# Altium footprint library PcbLib1.PcbLib: 2 footprints
Each footprint in its own frame and in the unit in brackets; x right, y up, seen from the top. Pads: shape width x height; smd on the part's side, far side on the other; paste and mask are expansions set on the pad; w line width, h text height; cw(c..) or ccw(c..) is an arc to the next point about the centre after c.
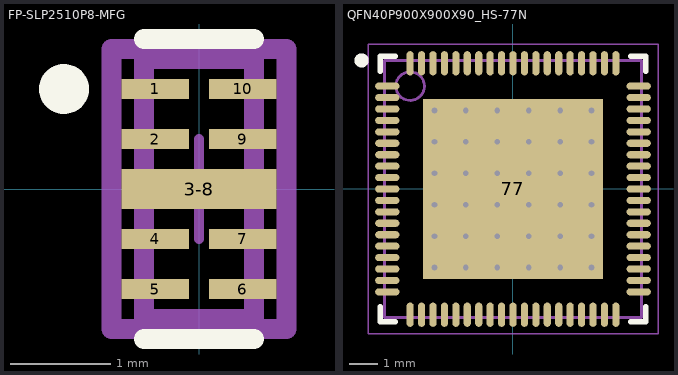
[diagram p0: the footprints below, top view; thin cyan lines are the x and y axes]

## FP-SLP2510P8-MFG [mm]
height 15.7
pads (9):
  rect 0.675x0.2 smd paste+0 mask+0: 1(-0.437,1) 2(-0.437,0.5) 4(-0.437,-0.5) 5(-0.437,-1) 6(0.437,-1) 7(0.437,-0.5) 9(0.437,0.5) 10(0.437,1)
  rect 1.55x0.4 smd paste+0 mask+0: 3-8(0,0)
Top Overlay:
  circle w0.25: c-1.35,1 r0.125
  lines w0.2: -0.55,-1.5 0.55,-1.5 ; -0.55,1.5 0.55,1.5
Top 3D Body:
  lines w0.2: -0.55,-1.3 0.55,-1.3 0.55,1.3 -0.55,1.3 -0.55,-1.3
Top Courtyard:
  lines w0.2: -0.875,-1.4 0.875,-1.4 0.875,1.4 -0.875,1.4 -0.875,-1.4
Top Assembly:
  lines w0.2: -0.875,-1.4 0.875,-1.4 0.875,1.4 -0.875,1.4 -0.875,-1.4
  text ".Designator" at 0,-0.001 h1
Top Component Center:
  lines w0.1: -0.5,0 0.5,0 ; 0,-0.5 0,0.5
3D body "Diode_Semtech_RCLAMP0524PATCT_eec.STEP": height 0.25, standoff 0, extent -0.875,-1.4 0.875,1.4

## QFN40P900X900X90_HS-77N [mm] "QFN, 76-Leads, Body 9.00x9.00mm, Pitch 0.40mm, Thermal Pad 6.30x6.30mm, IPC Medium Density"
height 0.9
pads (77):
  oval 0.85x0.25 smd: 1(-4.4,3.6) 2(-4.4,3.2) 3(-4.4,2.8) 4(-4.4,2.4) 5(-4.4,2) 6(-4.4,1.6) 7(-4.4,1.2) 8(-4.4,0.8) 9(-4.4,0.4) 10(-4.4,0) 11(-4.4,-0.4) 12(-4.4,-0.8) 13(-4.4,-1.2) 14(-4.4,-1.6) 15(-4.4,-2) 16(-4.4,-2.4) 17(-4.4,-2.8) 18(-4.4,-3.2) 19(-4.4,-3.6) 39(4.4,-3.6) 40(4.4,-3.2) 41(4.4,-2.8) 42(4.4,-2.4) 43(4.4,-2) 44(4.4,-1.6) 45(4.4,-1.2) 46(4.4,-0.8) 47(4.4,-0.4) 48(4.4,0) 49(4.4,0.4) 50(4.4,0.8) 51(4.4,1.2) 52(4.4,1.6) 53(4.4,2) 54(4.4,2.4) 55(4.4,2.8) 56(4.4,3.2) 57(4.4,3.6)
  oval 0.25x0.85 smd: 20(-3.6,-4.4) 21(-3.2,-4.4) 22(-2.8,-4.4) 23(-2.4,-4.4) 24(-2,-4.4) 25(-1.6,-4.4) 26(-1.2,-4.4) 27(-0.8,-4.4) 28(-0.4,-4.4) 29(0,-4.4) 30(0.4,-4.4) 31(0.8,-4.4) 32(1.2,-4.4) 33(1.6,-4.4) 34(2,-4.4) 35(2.4,-4.4) 36(2.8,-4.4) 37(3.2,-4.4) 38(3.6,-4.4) 58(3.6,4.4) 59(3.2,4.4) 60(2.8,4.4) 61(2.4,4.4) 62(2,4.4) 63(1.6,4.4) 64(1.2,4.4) 65(0.8,4.4) 66(0.4,4.4) 67(0,4.4) 68(-0.4,4.4) 69(-0.8,4.4) 70(-1.2,4.4) 71(-1.6,4.4) 72(-2,4.4) 73(-2.4,4.4) 74(-2.8,4.4) 75(-3.2,4.4) 76(-3.6,4.4)
  rect 6.3x6.3 smd: 77(0,0)
via 2.75,-2.75 diameter 0.5 hole 0.2
via 1.65,-2.75 diameter 0.5 hole 0.2
via 0.55,-2.75 diameter 0.5 hole 0.2
via -0.55,-2.75 diameter 0.5 hole 0.2
via -1.65,-2.75 diameter 0.5 hole 0.2
via -2.75,-2.75 diameter 0.5 hole 0.2
via 2.75,-1.65 diameter 0.5 hole 0.2
via 1.65,-1.65 diameter 0.5 hole 0.2
via 0.55,-1.65 diameter 0.5 hole 0.2
via -0.55,-1.65 diameter 0.5 hole 0.2
via -1.65,-1.65 diameter 0.5 hole 0.2
via -2.75,-1.65 diameter 0.5 hole 0.2
via 2.75,-0.55 diameter 0.5 hole 0.2
via 1.65,-0.55 diameter 0.5 hole 0.2
via 0.55,-0.55 diameter 0.5 hole 0.2
via -0.55,-0.55 diameter 0.5 hole 0.2
via -1.65,-0.55 diameter 0.5 hole 0.2
via -2.75,-0.55 diameter 0.5 hole 0.2
via 2.75,0.55 diameter 0.5 hole 0.2
via 1.65,0.55 diameter 0.5 hole 0.2
via 0.55,0.55 diameter 0.5 hole 0.2
via -0.55,0.55 diameter 0.5 hole 0.2
via -1.65,0.55 diameter 0.5 hole 0.2
via -2.75,0.55 diameter 0.5 hole 0.2
via 2.75,1.65 diameter 0.5 hole 0.2
via 1.65,1.65 diameter 0.5 hole 0.2
via 0.55,1.65 diameter 0.5 hole 0.2
via -0.55,1.65 diameter 0.5 hole 0.2
via -1.65,1.65 diameter 0.5 hole 0.2
via -2.75,1.65 diameter 0.5 hole 0.2
via 2.75,2.75 diameter 0.5 hole 0.2
via 1.65,2.75 diameter 0.5 hole 0.2
via 0.55,2.75 diameter 0.5 hole 0.2
via -0.55,2.75 diameter 0.5 hole 0.2
via -1.65,2.75 diameter 0.5 hole 0.2
via -2.75,2.75 diameter 0.5 hole 0.2
Top Overlay:
  circle w0.25: c-5.3,4.5 r0.125
  lines w0.2: -4.65,-4.125 -4.65,-4.65 -4.125,-4.65 ; -4.65,4.125 -4.65,4.65 -4.125,4.65 ; 4.125,-4.65 4.65,-4.65 4.65,-4.125 ; 4.125,4.65 4.65,4.65 4.65,4.125
Mechanical 13:
  circle w0.1: c-3.6,3.6 r0.5
  lines w0.1: -4.5,-4.5 4.5,-4.5 4.5,4.5 -4.5,4.5 -4.5,-4.5
Mechanical 15:
  lines w0.05: -5.075,-5.075 5.075,-5.075 5.075,5.075 -5.075,5.075 -5.075,-5.075
  lines w0.1: -0.5,0 0.5,0 ; 0,-0.5 0,0.5
3D body "QFN40P900X900X90_HS-77N.step": height 0.9, standoff 0, extent -4.55,-4.55 4.55,4.55